# Altium schematic symbol library DioneyaPWR.SchLib: 10 symbols
Pins are listed as number, name and electrical type; pins without a type are passive.

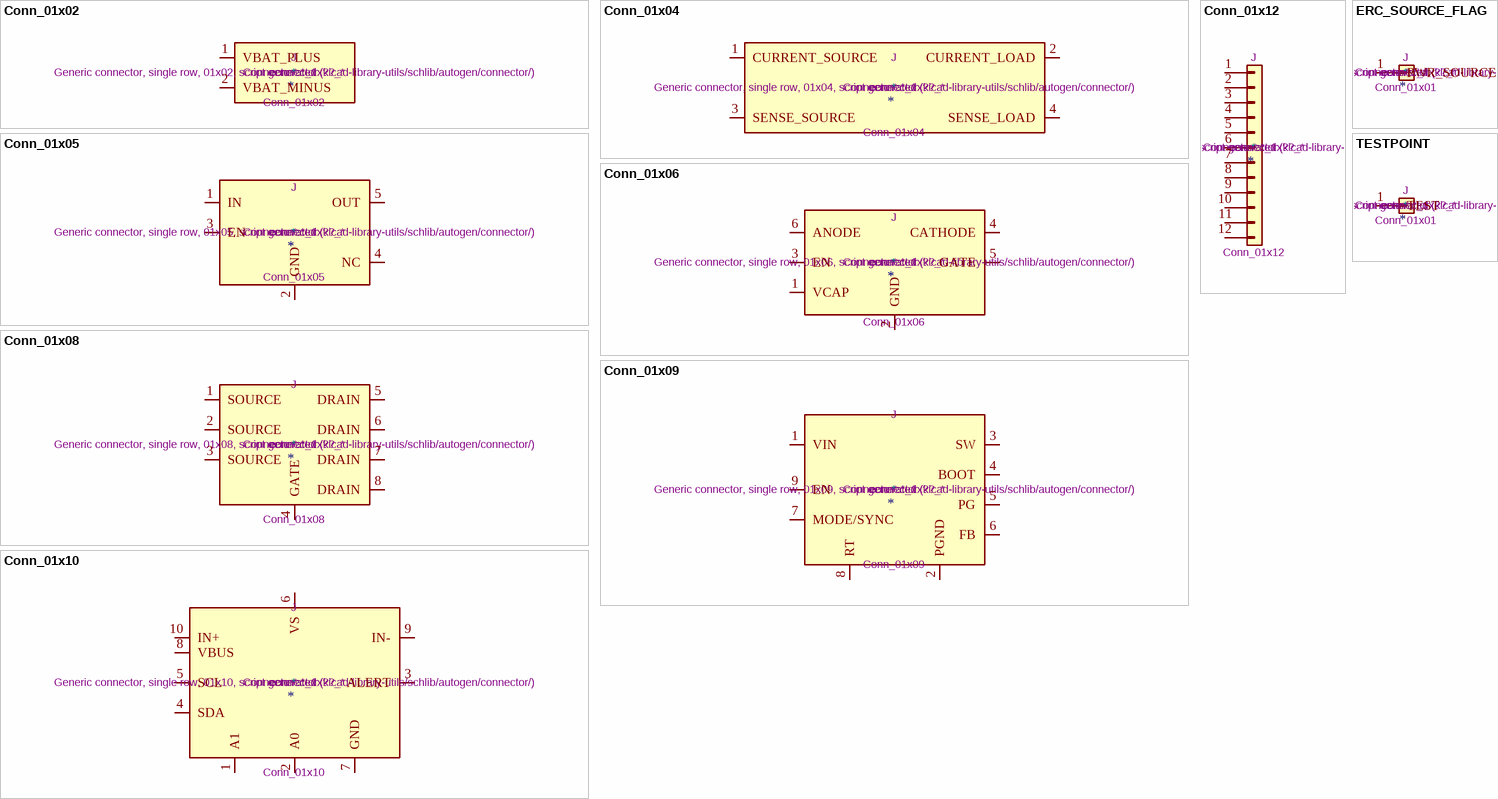
[diagram p0: symbols Conn_01x02 to TESTPOINT]

## Conn_01x02
designator *  value Conn_01x02  Reference: J  Datasheet: ~  ki_keywords: connector  ki_fp_filters: Connector*:*_1x??_*
Generic connector, single row, 01x02, script generated (kicad-library-utils/schlib/autogen/connector/); Description_: Generic connector, single row, 01x02, script generated (kicad-library-utils/schlib/autogen/connector/)
pins: 1 VBAT_PLUS, 2 VBAT_MINUS

## Conn_01x04
designator *  value Conn_01x04  Reference: J  Datasheet: ~  ki_keywords: connector  ki_fp_filters: Connector*:*_1x??_*
Generic connector, single row, 01x04, script generated (kicad-library-utils/schlib/autogen/connector/); Description_: Generic connector, single row, 01x04, script generated (kicad-library-utils/schlib/autogen/connector/)
pins: 1 CURRENT_SOURCE, 2 CURRENT_LOAD, 3 SENSE_SOURCE, 4 SENSE_LOAD

## Conn_01x05
designator *  value Conn_01x05  Reference: J  Datasheet: ~  ki_keywords: connector  ki_fp_filters: Connector*:*_1x??_*
Generic connector, single row, 01x05, script generated (kicad-library-utils/schlib/autogen/connector/); Description_: Generic connector, single row, 01x05, script generated (kicad-library-utils/schlib/autogen/connector/)
pins: 1 IN, 2 GND, 3 EN, 4 NC, 5 OUT

## Conn_01x06
designator *  value Conn_01x06  Reference: J  Datasheet: ~  ki_keywords: connector  ki_fp_filters: Connector*:*_1x??_*
Generic connector, single row, 01x06, script generated (kicad-library-utils/schlib/autogen/connector/); Description_: Generic connector, single row, 01x06, script generated (kicad-library-utils/schlib/autogen/connector/)
pins: 1 VCAP, 2 GND, 3 EN, 4 CATHODE, 5 GATE, 6 ANODE

## Conn_01x08
designator *  value Conn_01x08  Reference: J  Datasheet: ~  ki_keywords: connector  ki_fp_filters: Connector*:*_1x??_*
Generic connector, single row, 01x08, script generated (kicad-library-utils/schlib/autogen/connector/); Description_: Generic connector, single row, 01x08, script generated (kicad-library-utils/schlib/autogen/connector/)
pins: 1 SOURCE, 2 SOURCE, 3 SOURCE, 4 GATE, 5 DRAIN, 6 DRAIN, 7 DRAIN, 8 DRAIN

## Conn_01x09
designator *  value Conn_01x09  Reference: J  Datasheet: ~  ki_keywords: connector  ki_fp_filters: Connector*:*_1x??_*
Generic connector, single row, 01x09, script generated (kicad-library-utils/schlib/autogen/connector/); Description_: Generic connector, single row, 01x09, script generated (kicad-library-utils/schlib/autogen/connector/)
pins: 1 VIN, 2 PGND, 3 SW, 4 BOOT, 5 PG, 6 FB, 7 MODE/SYNC, 8 RT, 9 EN

## Conn_01x10
designator *  value Conn_01x10  Reference: J  Datasheet: ~  ki_keywords: connector  ki_fp_filters: Connector*:*_1x??_*
Generic connector, single row, 01x10, script generated (kicad-library-utils/schlib/autogen/connector/); Description_: Generic connector, single row, 01x10, script generated (kicad-library-utils/schlib/autogen/connector/)
pins: 1 A1, 2 A0, 3 ALERT, 4 SDA, 5 SCL, 6 VS, 7 GND, 8 VBUS, 9 IN-, 10 IN+

## Conn_01x12
designator *  value Conn_01x12  Reference: J  Datasheet: ~  ki_keywords: connector  ki_fp_filters: Connector*:*_1x??_*
Generic connector, single row, 01x12, script generated (kicad-library-utils/schlib/autogen/connector/); Description_: Generic connector, single row, 01x12, script generated (kicad-library-utils/schlib/autogen/connector/)
pins: 1 3V8_MODEM, 2 GND_MODEM, 3 3V3_DIGITAL, 4 GND_DIGITAL, 5 1V8_MIC, 6 GND_MIC, 7 PWR_GOOD, 8 FAULT, 9 EN_MODEM, 10 EN_AUX, 11 I2C2_SCL, 12 I2C2_SDA

## ERC_SOURCE_FLAG
designator *  value Conn_01x01  Reference: J  Datasheet: ~  ki_keywords: connector  ki_fp_filters: Connector*:*_1x??_*
Generic connector, single row, 01x01, script generated (kicad-library-utils/schlib/autogen/connector/); Description_: Generic connector, single row, 01x01, script generated (kicad-library-utils/schlib/autogen/connector/)
pins: 1 PWR_SOURCE

## TESTPOINT
designator *  value Conn_01x01  Reference: J  Datasheet: ~  ki_keywords: connector  ki_fp_filters: Connector*:*_1x??_*
Generic connector, single row, 01x01, script generated (kicad-library-utils/schlib/autogen/connector/); Description_: Generic connector, single row, 01x01, script generated (kicad-library-utils/schlib/autogen/connector/)
pins: 1 TEST